# Altium footprint library Ib_.PcbLib: 55 footprints (part 3 of 4)
Each footprint in its own frame and in the unit in brackets; x right, y up, seen from the top. Pads: shape width x height; smd on the part's side, far side on the other; paste and mask are expansions set on the pad; w line width, h text height; cw(c..) or ccw(c..) is an arc to the next point about the centre after c.
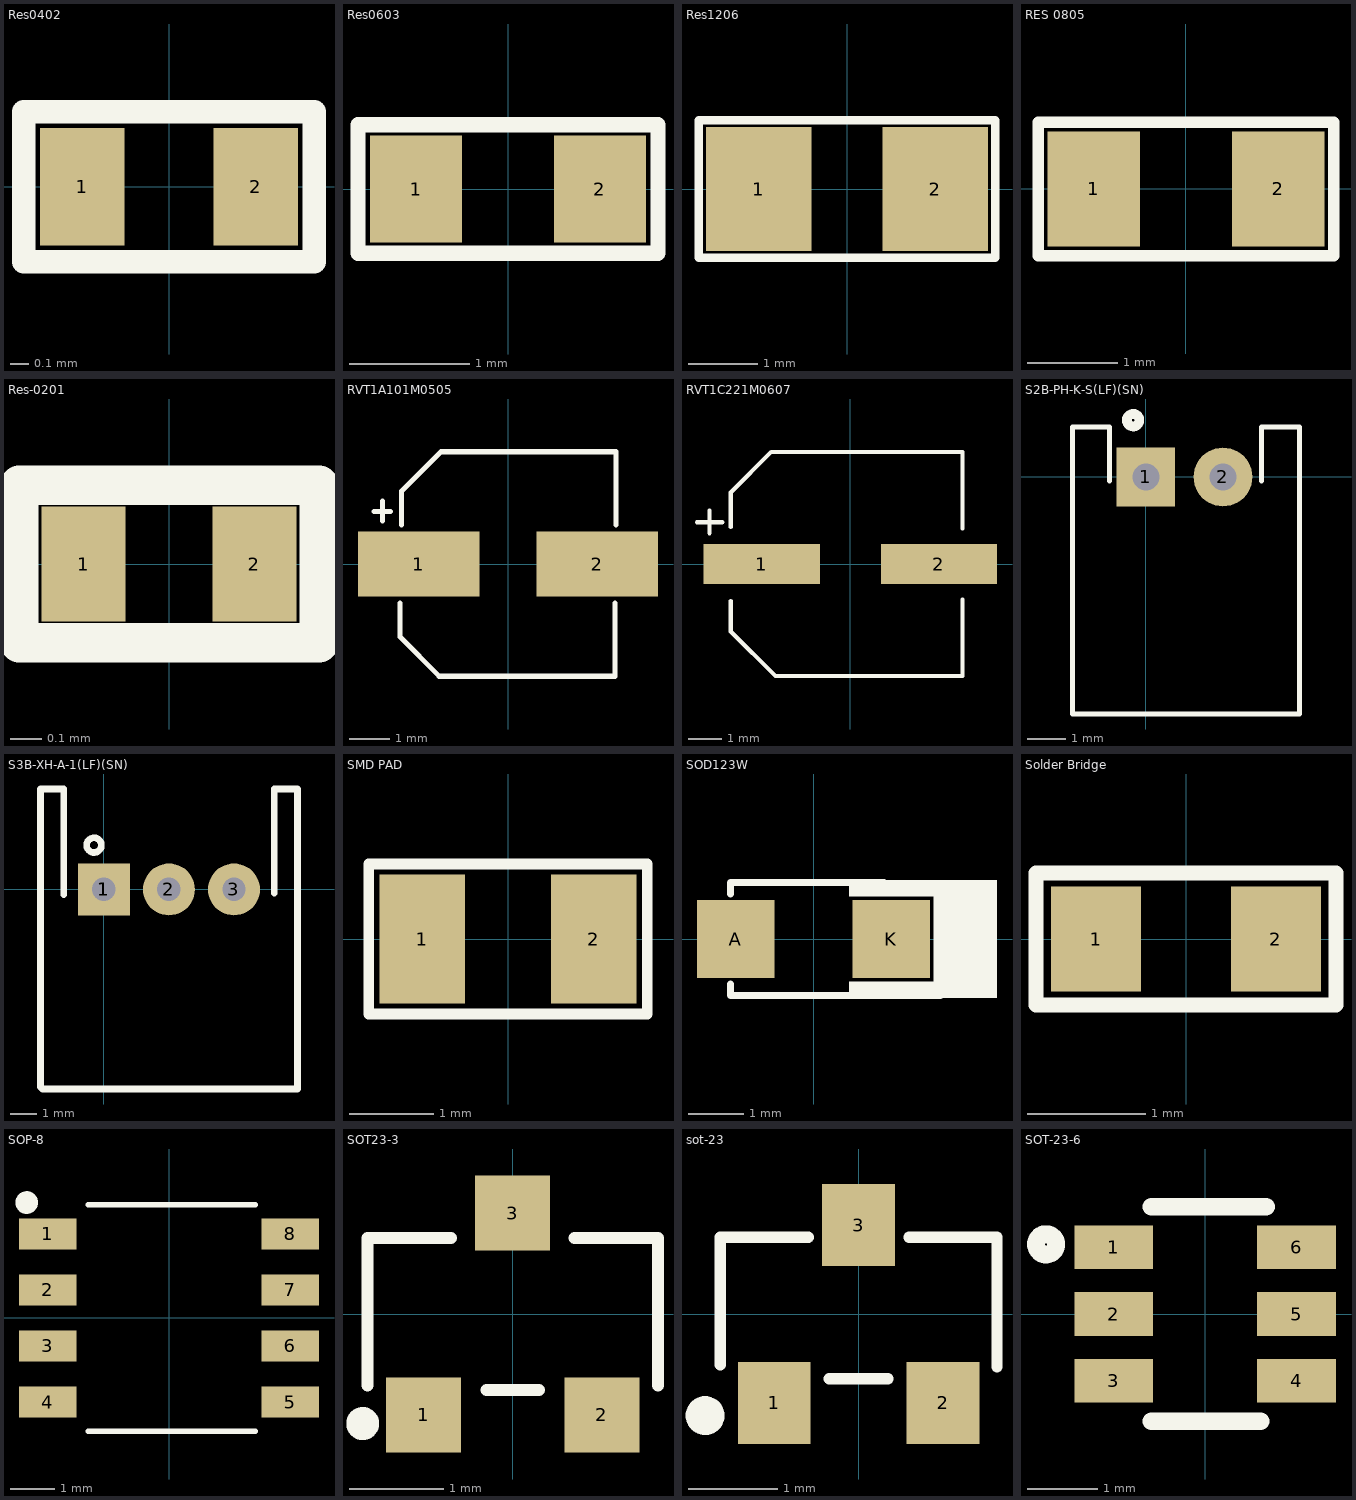
[diagram p2: the footprints below, top view; thin cyan lines are the x and y axes]

## Res0402 [mil]
pads (2):
  rect 18x25 smd mask+4: 1(-18.5,0) 2(18.5,0)
Top Overlay:
  lines w0.13: -32,-17 32,-17
  lines w5: -31,-16 -31,16 31,16 31,-16 -31,-16
3D body "User Library-RES_1005-0402.step": height 16.14, standoff 0, extent -22.63,-10.82 22.64,10.83

## Res0603 [mil]
pads (2):
  rect 30x35 smd: 1(-30,0) 2(30,0)
Top Overlay:
  lines w5: -49,-21 49,-21 49,21 -49,21 -49,-21
3D body "User Library-RESC1608X05N.step": height 17.76, standoff 0, extent -30.52,-16.74 30.51,16.73

## Res1206 [mil]
pads (2):
  rect 60x70 smd: 1(-50,0) 2(50,0)
Top Overlay:
  lines w5: -84,-39 84,-39 84,39 -84,39 -84,-39
3D body "User Library-1206 SMD Resistor.step": height 39.45, standoff 0, extent -62.99,-31.49 63,31.51

## RES 0805 [mil] "SMD 0805"
pads (2):
  rect 40x50 smd: 1(-40,0) 2(40,0)
Top Overlay:
  lines w5: -64,-29 64,-29 64,29 -64,29 -64,-29
3D body "User Library-CR2012-0805.STEP": height 23.62, standoff 0, extent -39.34,-24.75 39.4,24.46

## Res-0201 [mm]
pads (2):
  rect 0.27x0.37 smd: 1(-0.275,0) 2(0.275,0)
Top Overlay:
  lines w0.127: -0.483,-0.254 -0.483,0.254 0.483,0.254 0.483,-0.254 -0.483,-0.254
3D body "User Library-0201(0603M) Res.step": height 0.29, standoff -0.02, extent -0.305,-0.152 0.305,0.153

## RVT1A101M0505 [mm] "100uF ±20% 10V 5mm 5.4mm 2000hrs 105? -45?~+105? SMD,5x5.4mm Aluminum Electrolytic Capacitors - SMD RoHS"
pads (2):
  rect 3x1.6 smd: 1(-2.2,0) 2(2.2,0)
Top Overlay:
  lines w0.127: -3.302,1.295 -2.896,1.295 ; -3.099,1.067 -3.099,1.549 ; -2.666,-0.965 -2.666,-1.797 -1.694,-2.769 2.642,-2.769 2.642,-0.965 ; -2.627,0.965 -2.627,1.797 -1.655,2.769 2.667,2.769 2.667,0.965
3D body "CAP_UWF_5X5P4_NCH.step": height 5.57, standoff 0, extent -2.946,-2.654 2.946,2.654

## RVT1C221M0607 [mm]
pads (2):
  rect 3.5x1.2 smd: 1(-2.67,0) 2(2.67,0)
Top Overlay:
  lines w0.127: -4.623,1.257 -3.861,1.257 ; -4.242,0.927 -4.242,1.613 ; -3.607,-1.118 -3.607,-2.032 -2.261,-3.378 0,-3.378 3.378,-3.378 3.378,-1.067 ; -3.607,1.118 -3.607,2.159 -2.388,3.378 0,3.378 3.378,3.378 3.378,1.067

## S2B-PH-K-S(LF)(SN) [mil] "PH Header Male Pin 0.079\"(2.00mm) 2 Through Hole,P=2mm Wire To Board / Wire To Wire Connector RoHS"
pads (2):
  rect 60x60 hole 27.56: 1(0,0)
  round 60 hole 27.56: 2(78.74,0)
Top Overlay:
  circle w10: c-13,58 r6.32
  lines w5: -37,-4 -37,51 -75,51 -75,-242 157,-242 157,51 ; 118,-4 118,51 156,51
3D body "S2B-PH-K-S.STEP": height 188.98, standoff -133.86, extent -76.14,-246.21 156.14,53

## S3B-XH-A-1(LF)(SN) [mm] "XH Header Male Pin 0.098\"(2.50mm) 3 Through Hole,P=2.5mm Wire To Board / Wire To Wire Connector RoHS"
pads (4):
  rect 2x2 hole 0.9: 1(0,0)
  round 2 hole 0.9: 1(0,0) 2(2.5,0) 3(5,0)
Top Overlay:
  circle w0.254: c-0.381,1.702 r0.284
  lines w0.254: -1.543,-0.203 -1.543,3.861 -2.438,3.861 -2.438,-7.595 -2.362,-7.671 7.442,-7.671 7.442,3.861 6.553,3.861 6.553,-0.152
3D body "S3B-XH-A-1.STEP": height 6, standoff -3.55, extent -2.435,-7.62 7.465,3.88

## SMD PAD [mil] "SMD 0805"
pads (2):
  rect 40x60 smd: 1(-40,0) 2(40,0)
Top Overlay:
  lines w5: -65,-35 -65,35 65,35 65,-35 -65,-35

## SOD123W [mm] "DIODE SCHOTTKY 30V 1A SOD123W"
pads (2):
  rect 1.4x1.4 smd: A(-1.4,0) K(1.4,0)
Top Overlay:
  region: 3.302,1.067 2.159,1.067 2.159,-1.067 3.302,-1.067
  region: 2.286,-0.762 0.635,-0.762 0.635,-1.067 2.286,-1.067
  region: 2.286,1.067 0.635,1.067 0.635,0.762 2.286,0.762
  lines w0.127: -1.499,-0.813 -1.499,-1.016 2.286,-1.016 ; -1.499,0.813 -1.499,1.016 -1.143,1.016 1.27,1.016
3D body "User Library-SOD123W.step": height 1.1, standoff -0.01, extent -2,-0.95 2,0.95

## Solder Bridge [mil] "Solder Bridge ON"
pads (2):
  rect 30x35 smd: 1(-30,0) 2(30,0)
Top Overlay:
  lines w5: -50,-22 -50,22 50,22 50,-22 -50,-22

## SOP-8 [mm]
pads (8):
  rect 1.3x0.7 smd: 1(-2.75,1.905) 2(-2.75,0.635) 3(-2.75,-0.635) 4(-2.75,-1.905) 5(2.75,-1.905) 6(2.75,-0.635) 7(2.75,0.635) 8(2.75,1.905)
Top Overlay:
  circle w0.254: c-3.226,2.616 r0.13
  lines w0.127: -1.829,-2.565 1.956,-2.565 ; -1.829,2.565 1.956,2.565
3D body "SOP-8.STEP": height 1.87, standoff 0, extent -3.11,-2.5 3.11,2.5

## SOT23-3 [mm] "SOT23, 3-Leads, Body 2.9x1.3mm, Pitch 0.95mm, Lead Span 2.3mm - Reverse Pinning, IPC High Density"
height 1.1
pads (3):
  rect 0.8x0.8 smd: 1(-0.95,-1.075) 2(0.95,-1.075) 3(0,1.075)
Top Overlay:
  circle w0.25: c-1.6,-1.168 r0.051
  lines w0.127: -1.55,-0.762 -1.55,0.813 -0.661,0.813 ; -0.28,-0.813 0.279,-0.813 ; 0.66,0.813 1.549,0.813 1.549,-0.762
3D body "CircuitWorks-SOT-23.step": height 1.05, standoff -0.05, extent -1.5,-1.25 1.5,1.25

## sot-23 [mm]
pads (3):
  rect 0.82x0.92 smd: 1(-0.95,-1) 2(0.95,-1) 3(0,1)
Top Overlay:
  circle w0.254: c-1.727,-1.143 r0.092
  lines w0.127: -1.556,-0.572 -1.556,0.864 -0.566,0.864 ; -0.33,-0.728 0.33,-0.728 ; 0.566,0.864 1.556,0.864 1.556,-0.594
3D body "CircuitWorks-SOT-23.step": height 1.1, standoff 0, extent -1.5,-1.25 1.5,1.25

## SOT-23-6 [mm] "IC BAT CHG LI-ION 1 CELL SOT23-6"
pads (6):
  rect 1.12x0.62 smd: 1(-1.3,0.95) 2(-1.3,0) 3(-1.3,-0.95) 4(1.3,-0.95) 5(1.3,0) 6(1.3,0.95)
Top Overlay:
  circle w0.254: c-2.261,0.991 r0.144
  lines w0.254: -0.762,-1.524 0.787,-1.524 ; -0.762,1.524 0.864,1.524
3D body "User Library-SOT23-6-2.step": height 1.44, standoff -0.01, extent -1.4,-1.45 1.4,1.45